# EAGLE library part TPS63802 (library orb)
TI TPS63802DLAR buck-boost 3.3 V (VSON-10)
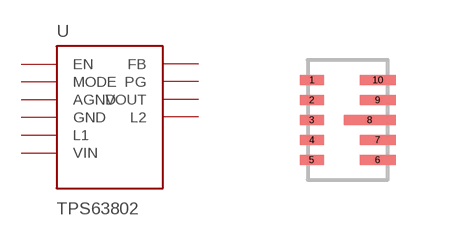
[diagram p4: symbol with the pads of VSON10_2X3; footprint VSON10_2X3]

Designator prefix U

## TPS63802  [VSON10_2X3]
1  EN  pas
2  MODE  pas
3  AGND  pas
4  FB  pas
5  PG  pas
6  VOUT  pas
7  L2  pas
8  GND  pas
9  L1  pas
10  VIN  pas

## Footprint VSON10_2X3 (pad centres in mm)
TI TPS63802 DLA0010A, drawing 4223750/D land pattern. 2 x 3 mm body; asymmetric ten-lead package, no pad 11. Source: https://www.ti.com/lit/ds/symlink/tps63802.pdf
smd 0.6 x 0.25: 1 -0.9,1; 2 -0.9,0.5; 3 -0.9,0; 4 -0.9,-0.5; 5 -0.9,-1
smd 0.9 x 0.25: 6 0.75,-1; 7 0.75,-0.5; 9 0.75,0.5; 10 0.75,1
smd 1.3 x 0.25: 8 0.55,0